# Altium footprint library Footprint-Lib-PhilsLab.PcbLib: 544 footprints (part 10 of 34)
Each footprint in its own frame and in the unit in brackets; x right, y up, seen from the top. Pads: shape width x height; smd on the part's side, far side on the other; paste and mask are expansions set on the pad; w line width, h text height; cw(c..) or ccw(c..) is an arc to the next point about the centre after c.
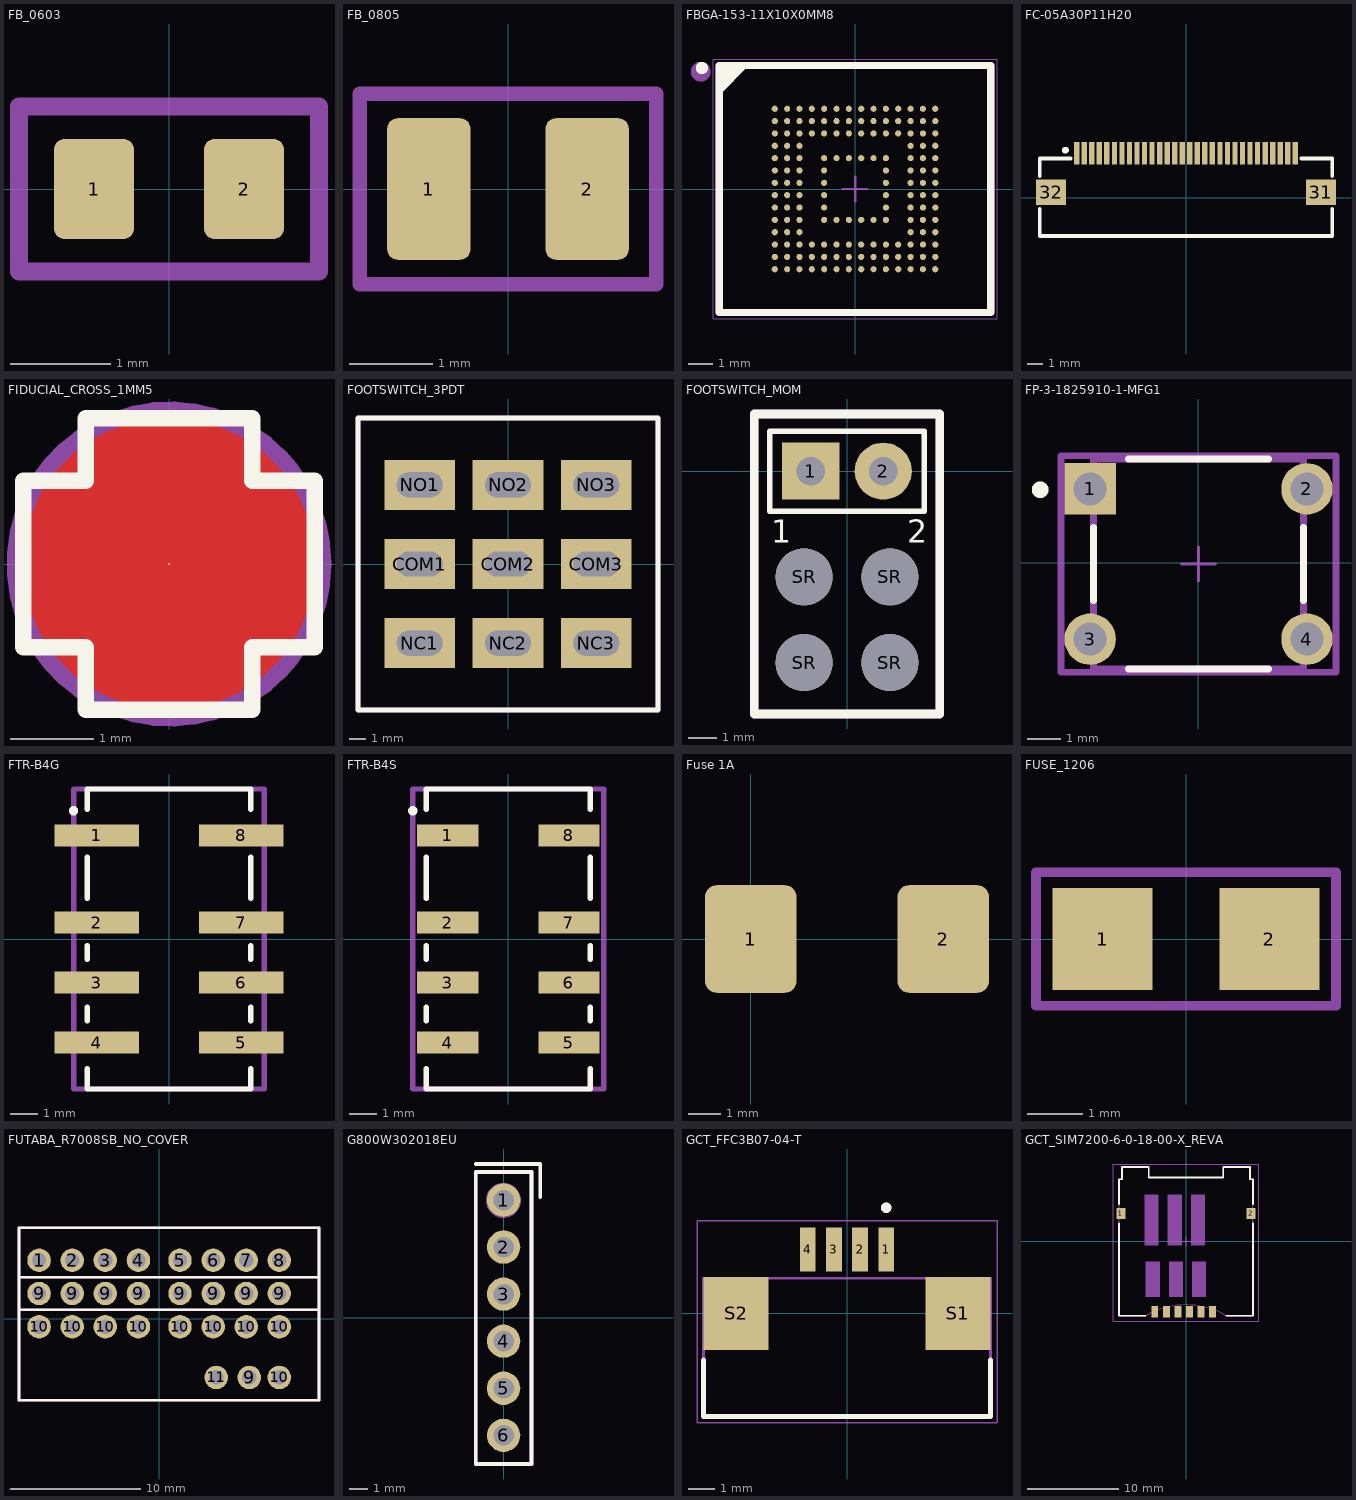
[diagram p9: the footprints below, top view; thin cyan lines are the x and y axes]

## FB_0603 [mm]
pads (2):
  rrect25% 0.8x1 smd: 1(-0.75,0) 2(0.75,0)
Mechanical 13:
  lines w0.175: -1.5,-0.825 1.5,-0.825 1.5,0.825 -1.5,0.825 -1.5,-0.825
  text "'.Designator'" at -5.665,-0.417 h1
3D body "FB-0603.STEP": height 0.81, standoff 0.01, extent -0.8,-0.4 0.8,0.4

## FB_0805 [mm]
pads (2):
  rrect25% 1x1.7 smd: 1(-0.95,0) 2(0.95,0)
Mechanical 13:
  lines w0.175: -1.778,-1.143 1.778,-1.143 1.778,1.143 -1.778,1.143 -1.778,-1.143
  text "'.Designator'" at -5.665,-0.417 h1
3D body "FB_0805.STEP": height 0.86, standoff 0.01, extent -1,-0.625 1,0.625

## FBGA-153-11X10X0MM8 [mm]
height 0.8
pads (152):
  round 0.25 smd: A1(-3.25,3.25) A2(-2.75,3.25) A3(-2.25,3.25) A4(-1.75,3.25) A5(-1.25,3.25) A6(-0.75,3.25) A7(-0.25,3.25) A8(0.25,3.25) A9(0.75,3.25) A10(1.25,3.25) A11(1.75,3.25) A12(2.25,3.25) A13(2.75,3.25) A14(3.25,3.25) B1(-3.25,2.75) B2(-2.75,2.75) B3(-2.25,2.75) B4(-1.75,2.75) B5(-1.25,2.75) B6(-0.75,2.75) B7(-0.25,2.75) B8(0.25,2.75) B9(0.75,2.75) B10(1.25,2.75) B11(1.75,2.75) B12(2.25,2.75) B13(2.75,2.75) B14(3.25,2.75) C1(-3.25,2.25) C2(-2.75,2.25) C3(-2.25,2.25) C4(-1.75,2.25) C5(-1.25,2.25) C6(-0.75,2.25) C7(-0.25,2.25) C8(0.25,2.25) C9(0.75,2.25) C10(1.25,2.25) C11(1.75,2.25) C12(2.25,2.25) C13(2.75,2.25) C14(3.25,2.25) D1(-3.25,1.75) D2(-2.75,1.75) D3(-2.25,1.75) D12(2.25,1.75) D13(2.75,1.75) D14(3.25,1.75) E1(-3.25,1.25) E2(-2.75,1.25) E3(-2.25,1.25) E5(-1.25,1.25) E6(-0.75,1.25) E7(-0.25,1.25) E8(0.25,1.25) E9(0.75,1.25) E10(1.25,1.25) E12(2.25,1.25) E13(2.75,1.25) E14(3.25,1.25) F1(-3.25,0.75) F2(-2.75,0.75) F3(-2.25,0.75) F5(-1.25,0.75) F10(1.25,0.75) F12(2.25,0.75) F13(2.75,0.75) F14(3.25,0.75) G1(-3.25,0.25) G2(-2.75,0.25) G3(-2.25,0.25) G5(-1.25,0.25) G10(1.25,0.25) G12(2.25,0.25) G13(2.75,0.25) G14(3.25,0.25) H1(-3.25,-0.25) H2(-2.75,-0.25) H3(-2.25,-0.25) H5(-1.25,-0.25) H10(1.25,-0.25) H12(2.25,-0.25) H13(2.75,-0.25) H14(3.25,-0.25) J1(-3.25,-0.75) J2(-2.75,-0.75) J3(-2.25,-0.75) J5(-1.25,-0.75) J10(1.25,-0.75) J12(2.25,-0.75) J13(2.75,-0.75) J14(3.25,-0.75) K1(-3.25,-1.25) K2(-2.75,-1.25) K3(-2.25,-1.25) K5(-1.25,-1.25) K6(-0.75,-1.25) K7(-0.25,-1.25) K8(0.25,-1.25) K9(0.75,-1.25) K10(1.25,-1.25) K12(2.25,-1.25) K13(2.75,-1.25) K14(3.25,-1.25) L1(-3.25,-1.75) L2(-2.75,-1.75) L3(-2.25,-1.75) L12(2.25,-1.75) L13(2.75,-1.75) L14(3.25,-1.75) M1(-3.25,-2.25) M2(-2.75,-2.25) M3(-2.25,-2.25) M4(-1.75,-2.25) M5(-1.25,-2.25) M6(-0.75,-2.25) M7(-0.25,-2.25) M8(0.25,-2.25) M9(0.75,-2.25) M10(1.25,-2.25) M11(1.75,-2.25) M12(2.25,-2.25) M13(2.75,-2.25) M14(3.25,-2.25) N1(-3.25,-2.75) N2(-2.75,-2.75) N3(-2.25,-2.75) N4(-1.75,-2.75) N5(-1.25,-2.75) N6(-0.75,-2.75) N7(-0.25,-2.75) N8(0.25,-2.75) N9(0.75,-2.75) N10(1.25,-2.75) N11(1.75,-2.75) N12(2.25,-2.75) N13(2.75,-2.75) N14(3.25,-2.75) P1(-3.25,-3.25) P2(-2.75,-3.25) P3(-2.25,-3.25) P4(-1.75,-3.25) P5(-1.25,-3.25) P6(-0.75,-3.25) P7(-0.25,-3.25) P8(0.25,-3.25) P9(0.75,-3.25) P10(1.25,-3.25) P11(1.75,-3.25) P12(2.25,-3.25) P13(2.75,-3.25) P14(3.25,-3.25)
Top Overlay:
  circle w0.25: c-6.2,4.9 r0.125
  region: -4.5,5 -5.5,4 -5.5,5
  lines w0.3: -5.5,4 -4.5,5 ; -5.5,-5 5.5,-5 5.5,5 -5.5,5 -5.5,-5
Mechanical 13:
  circle w0.5: c-6.25,4.75 r0.15
  lines w0.3: -5.5,-5 5.5,-5 5.5,5 -5.5,5 -5.5,-5
  text "'.Designator'" at -5.665,-0.417 h1
Mechanical 15:
  lines w0.05: -5.75,-5.25 5.75,-5.25 5.75,5.25 -5.75,5.25 -5.75,-5.25
  lines w0.1: -0.5,0 0.5,0 ; 0,-0.5 0,0.5
3D body "FBGA-153-11X10X0MM8.step": height 0.8, standoff 0, extent -5.5,-5 5.5,5

## FC-05A30P11H20 [mm] "30PIN FFC Connector"
pads (32):
  rect 0.35x1.5 smd: 1(-7.254,2.943) 2(-6.754,2.943) 3(-6.254,2.943) 4(-5.754,2.943) 5(-5.254,2.943) 6(-4.754,2.943) 7(-4.254,2.943) 8(-3.754,2.943) 9(-3.254,2.943) 10(-2.754,2.943) 11(-2.254,2.943) 12(-1.754,2.943) 13(-1.254,2.943) 14(-0.754,2.943) 15(-0.254,2.943) 16(0.246,2.943) 17(0.746,2.943) 18(1.246,2.943) 19(1.746,2.943) 20(2.246,2.943) 21(2.746,2.943) 22(3.246,2.943) 23(3.746,2.943) 24(4.246,2.943) 25(4.746,2.943) 26(5.246,2.943) 27(5.746,2.943) 28(6.246,2.943) 29(6.746,2.943) 30(7.246,2.943)
  rect 2x1.7 smd: 31(8.946,0.343) 32(-8.954,0.343)
Top Overlay:
  circle w0.254: c-8.004,3.143 r0.1
  lines w0.254: -9.704,-0.738 -9.704,-2.557 9.696,-2.557 9.695,-0.738 ; -9.704,1.424 -9.704,2.583 -7.66,2.583 ; 7.652,2.583 9.695,2.583 9.695,1.424

## FIDUCIAL_CROSS_1MM5 [mil]
pads (1):
  round 1 smd paste-19.68: FM(0,0)
Top Layer:
  pour cut-out: 0,68.9 6.79,68.9 20.1,66.25 32.64,61.06 43.92,53.52 53.52,43.92 61.06,32.64 66.25,20.1 68.9,6.79 68.9,0 68.9,-6.79 66.25,-20.1 61.06,-32.64 53.52,-43.92 43.92,-53.52 32.64,-61.06 20.1,-66.25 6.79,-68.9 0,-68.9 -6.79,-68.9 -20.1,-66.25 -32.64,-61.06 -43.92,-53.52 -53.52,-43.92 -61.06,-32.64 -66.25,-20.1 -68.9,-6.79 -68.9,0 -68.9,6.79 -66.25,20.1 -61.06,32.64 -53.52,43.92 -43.92,53.52 -32.64,61.06 -20.1,66.25 -6.79,68.9
  region: -9.84,-29.53 -9.84,-9.84 -29.53,-9.84 -29.53,9.84 -9.84,9.84 -9.84,29.53 9.84,29.53 9.84,9.84 29.53,9.84 29.53,-9.84 9.84,-9.84 9.84,-29.53
Top Overlay:
  lines w7.87: -68.9,-39.37 -68.9,0 -68.9,39.37 -39.37,39.37 -39.37,68.9 39.37,68.9 39.37,39.37 68.9,39.37 68.9,-39.37 39.37,-39.37 39.37,-68.9 -39.37,-68.9 -39.37,-39.37 -68.9,-39.37
Top Solder:
  region: -59.06,29.53 -29.53,29.53 -29.53,59.06 29.53,59.06 29.53,29.53 59.06,29.53 59.06,-29.53 29.53,-29.53 29.53,-59.06 -29.53,-59.06 -29.53,-29.53 -59.06,-29.53
Mechanical 13:
  circle w11.81: c0,0 r70.98
  text "'.Designator'" at -223.03,-16.4 h39.37

## FOOTSWITCH_3PDT [mm]
pads (9):
  rect 4.25x3 hole 1.5 slot 2.75 at 0 deg: COM1(-5.3,0) COM2(0,0) COM3(5.3,0) NC1(-5.3,-4.75) NC2(0,-4.75) NC3(5.3,-4.75) NO1(-5.3,4.75) NO2(0,4.75) NO3(5.3,4.75)
Top Overlay:
  lines w0.3: -9,-8.75 -9,8.75 -6.5,8.75 9,8.75 9,-8.75 -9,-8.75
Mechanical 13:
  lines w0.3: -9,-8.75 -9,8.75 9,8.75 9,-8.75 -9,-8.75
  text "'.Designator'" at -5.665,-0.417 h1
3D body "3PDT_Footswitch_NoNutNoWasher.step": height 37.96, standoff -4.14, extent -9.8,-8.5 9.8,8.5

## FOOTSWITCH_MOM [mm]
pads (6):
  rect 2x2 hole 1 mask+0.1: 1(-1.27,0)
  round 2 hole 1 mask+0.1: 2(1.27,0)
  round 2 hole 2 unplated mask+0.1: SR(-1.5,-6.7) SR(-1.5,-3.7) SR(1.5,-6.7) SR(1.5,-3.7)
Top Overlay:
  lines w0.2: -2.7,-1.4 -2.7,1.4 2.7,1.4 2.7,-1.4 -2.7,-1.4
  lines w0.3: -3.25,-8.5 -3.25,2 3.25,2 3.25,-8.5 -3.25,-8.5
  text "2" at 2.117,-2.5 h0.8
  text "1" at -2.65,-2.5 h0.8
Mechanical 13:
  lines w0.3: -3.25,-8.5 -3.25,2 3.25,2 3.25,-8.5 -3.25,-8.5
  text "STRAIN RELIEF" at -2.399,-6.52 h0.8
  text "2" at 2.117,-2.5 h0.8
  text "1" at -2.65,-2.5 h0.8
  text "'.Designator'" at -5.665,-0.417 h1
3D body "Header_1x2.STEP": height 8.44, standoff -2.54, extent -2.535,-1.273 2.545,1.267

## FP-3-1825910-1-MFG1 [mm]
pads (4):
  rect 1.54x1.54 hole 0.99 paste-2539.97 mask+0: 1(-3.246,2.215)
  round 1.54 hole 0.99 paste-2539.97 mask+0: 2(3.254,2.215) 3(-3.246,-2.285) 4(3.254,-2.285)
Top Overlay:
  circle w0.25: c-4.741,2.19 r0.125
  lines w0.2: -3.141,-1.14 -3.141,1.07 ; -2.101,-3.18 2.109,-3.18 ; -2.101,3.11 2.109,3.11 ; 3.149,-1.14 3.149,1.07
Top Component Center:
  lines w0.1: -0.496,-0.035 0.504,-0.035 ; 0.004,-0.535 0.004,0.465
Top 3D Body:
  lines w0.2: -3.141,-3.18 3.149,-3.18 3.149,3.11 -3.141,3.11 -3.141,-3.18
Top Assembly:
  lines w0.2: -4.116,-3.28 4.124,-3.28 4.124,3.21 -4.116,3.21 -4.116,-3.28
  text ".Designator" at 0.004,0.153 h1
Top Courtyard:
  lines w0.2: -4.116,-3.28 4.124,-3.28 4.124,3.21 -4.116,3.21 -4.116,-3.28
3D body "tactileswitch-short.STEP": height 4.95, standoff -3.38, extent -3.886,-3.064 3.806,2.944

## FTR-B4G [mm]
pads (8):
  rect 3.1x0.8 smd: 1(-2.65,3.8) 2(-2.65,0.6) 3(-2.65,-1.6) 4(-2.65,-3.8) 5(2.65,-3.8) 6(2.65,-1.6) 7(2.65,0.6) 8(2.65,3.8)
Top Overlay:
  circle w0.3: c-3.5,4.7 r0.021
  lines w0.2: -3,-4.75 -3,-5.5 3,-5.5 3,-4.75 ; -3,-3 -3,-2.5 ; -3,-0.75 -3,-0.25 ; -3,1.5 -3,3 ; -3,4.75 -3,5.5 3,5.5 3,4.75 ; 3,-3 3,-2.5 ; 3,-0.75 3,-0.25 ; 3,1.5 3,3
Mechanical 13:
  circle w0.3: c-2.2,3.8 r0.108
  lines w0.2: -3.5,-5.5 -3.5,5.5 3.5,5.5 3.5,-5.5 -3.5,-5.5
  text ".Designator" at -4.998,-0.333 h1
3D body "FTR-B4G.step": height 9.72, standoff 0.01, extent -3.706,-5.3 3.7,5.3

## FTR-B4S [mm]
pads (8):
  rect 2.25x0.8 smd: 1(-2.225,3.8) 2(-2.225,0.6) 3(-2.225,-1.6) 4(-2.225,-3.8) 5(2.225,-3.8) 6(2.225,-1.6) 7(2.225,0.6) 8(2.225,3.8)
Top Overlay:
  circle w0.3: c-3.5,4.7 r0.021
  lines w0.2: -3,-4.75 -3,-5.5 3,-5.5 3,-4.75 ; -3,-3 -3,-2.5 ; -3,-0.75 -3,-0.25 ; -3,1.5 -3,3 ; -3,4.75 -3,5.5 3,5.5 3,4.75 ; 3,-3 3,-2.5 ; 3,-0.75 3,-0.25 ; 3,1.5 3,3
Mechanical 13:
  circle w0.3: c-2.2,3.8 r0.108
  lines w0.2: -3.5,-5.5 3.5,-5.5 3.5,5.5 -3.5,5.5 -3.5,-5.5
  text ".Designator" at -4.998,-0.333 h1
3D body "FTR-B4S.step": height 9.72, standoff 0.01, extent -2.852,-5.3 2.85,5.3

## Fuse 1A [mm] "TA2VT1_C3014117"
pads (2):
  rrect25% 2.8x3.3 smd: 1(0,0) 2(5.9,0)
3D body "Fuse_JFC2410-1800FS.STEP": height 2.08, standoff -0.08, extent -0.05,-1.2 6.05,1.3

## FUSE_1206 [mm]
pads (2):
  rect 1.8x1.84 smd: 1(-1.5,0) 2(1.5,0)
Mechanical 13:
  lines w0.175: -2.7,-1.2 -2.7,1.2 2.7,1.2 2.7,-1.2 -2.7,-1.2
  text "'.Designator'" at -5.665,-0.417 h1
3D body "Fuse_1206.stp": height 0.84, standoff 0.01, extent -1.652,-0.815 1.652,0.815

## FUTABA_R7008SB_NO_COVER [mm]
pads (27):
  round 1.8 hole 1.1: 1(-9.212,4.487) 2(-6.672,4.487) 3(-4.132,4.487) 4(-1.592,4.487) 5(1.593,4.487) 6(4.133,4.487) 7(6.673,4.487) 8(9.213,4.487) 9(-9.212,1.947) 9(-6.672,1.947) 9(-4.132,1.947) 9(-1.592,1.947) 9(1.593,1.947) 9(4.133,1.947) 9(6.673,1.947) 9(6.913,-4.487) 9(9.213,1.947) 10(-9.212,-0.593) 10(-6.672,-0.593) 10(-4.132,-0.593) 10(-1.592,-0.593) 10(1.593,-0.593) 10(4.133,-0.593) 10(6.673,-0.593) 10(9.213,-4.487) 10(9.213,-0.593) 11(4.373,-4.487)
Top Overlay:
  lines w0.2: -10.75,0.7 12.25,0.7 ; -10.75,3.2 12.25,3.2 ; -10.75,-6.25 12.25,-6.25 12.25,7 -10.75,7 -10.75,-6.25
Mechanical 13:
  lines w0.2: -10.75,0.7 12.25,0.7 ; -10.75,3.2 12.25,3.2 ; -10.75,-6.25 12.25,-6.25 12.25,7 -10.75,7 -10.75,-6.25
  text "'.Designator'" at -5.665,-0.417 h1
3D body "FUTABA_R7008SB_NO_COVER.STEP": height 39.51, standoff -5.99, extent -10.45,-5.94 11.95,6.76

## G800W302018EU [mm]
pads (6):
  round 1.8 hole 1.1 mask+0.07: 1(0,6.35) 2(0,3.81) 3(0,1.27) 4(0,-1.27) 5(0,-3.81) 6(0,-6.35)
Top Overlay:
  lines w0.2: -1.5,8.3 1.972,8.3 1.972,6.5 ; -1.5,-7.9 1.5,-7.9 1.5,7.863 -1.5,7.863 -1.5,-7.9
Mechanical 13:
  circle w0.25: c-0.012,6.336 r0.823
  lines w0.2: -1.5,-7.9 1.5,-7.9 1.5,7.864 -1.5,7.864 -1.5,-7.9
  text "'.Designator'" at -5.84,-0.925 h1
3D body "g800w302xxxeu.stp": height 8.61, standoff -2.99, extent -1.25,-7.62 1.25,7.62

## GCT_FFC3B07-04-T [mm]
height 2.5
pads (6):
  rect 0.6x1.7 smd: 1(1.5,2.45) 2(0.5,2.45) 3(-0.5,2.45) 4(-1.5,2.45)
  rect 2.5x2.8 smd: S1(4.25,0) S2(-4.25,0)
Top Overlay:
  circle w0.2: c1.5,4.05 r0.1
  lines w0.2: -5.5,-1.8 -5.5,-3.95 5.5,-3.95 5.5,-1.8
Mechanical 13:
  circle w0.2: c1.5,4.05 r0.1
  lines w0.1: -5.5,-3.95 5.5,-3.95 5.5,1.35 -5.5,1.35 -5.5,-3.95
Mechanical 15:
  lines w0.05: -5.75,-4.2 -5.75,3.55 5.75,3.55 5.75,-4.2 -5.75,-4.2
3D body "step_temp.STEP": height 2.5, standoff 0, extent -5.5,-3.95 5.5,2.8

## GCT_SIM7200-6-0-18-00-X_REVA [mm]
pads (8):
  rect 1x1.2 smd: 1(-7.15,3.075) 2(7.15,3.075)
  rect 0.75x1.25 smd: C1(-2.16,-7.75) C2(0.38,-7.75) C3(2.92,-7.75) C5(-3.43,-7.75) C6(-0.89,-7.75) C7(1.65,-7.75)
Top Overlay:
  lines w0.2: -7.35,2 -7.35,-8.175 -4.42,-8.175 ; -7.35,4.1 -7.35,6.825 -7.025,6.825 -7.025,8.175 -4.095,8.175 -4.095,7.025 4.095,7.025 4.095,8.175 7.025,8.175 7.025,6.825 7.35,6.825 7.35,4.1 ; 4.42,-8.175 7.35,-8.175 7.35,2
Mechanical 13:
  lines w0.1: -4.42,-8.175 -7.35,-8.175 -7.35,6.825 -7.025,6.825 -7.025,8.175 -4.095,8.175 -4.095,7.025 4.095,7.025 4.095,8.175 7.025,8.175 7.025,6.825 7.35,6.825 7.35,-8.175 4.42,-8.175 ; -4.37,-8.146 cw(c0,-15.715) 4.37,-8.146
Mechanical 15:
  region: 2.18,-6.105 0.68,-6.105 0.68,-2.215 2.18,-2.215
  region: -0.49,-0.405 -1.99,-0.405 -1.99,5.095 -0.49,5.095
  region: -0.36,-6.105 -1.86,-6.105 -1.86,-2.215 -0.36,-2.215
  region: 2.05,-0.405 0.55,-0.405 0.55,5.095 2.05,5.095
  region: -2.9,-6.105 -4.4,-6.105 -4.4,-2.215 -2.9,-2.215
  region: -3.03,-0.405 -4.53,-0.405 -4.53,5.095 -3.03,5.095
  lines w0.05: -8,-8.75 8,-8.75 8,8.5 -8,8.5 -8,-8.75
  lines w0.1: -0.5,0 0.5,0 ; 0,-0.5 0,0.5
3D body "step_temp.STEP": height 1.74, standoff -0.01, extent -7.45,-8.25 7.25,8.1